# Altium footprint library FootPrintLib_9.PcbLib: 287 footprints (part 9 of 18)
Each footprint in its own frame and in the unit in brackets; x right, y up, seen from the top. Pads: shape width x height; smd on the part's side, far side on the other; paste and mask are expansions set on the pad; w line width, h text height; cw(c..) or ccw(c..) is an arc to the next point about the centre after c.
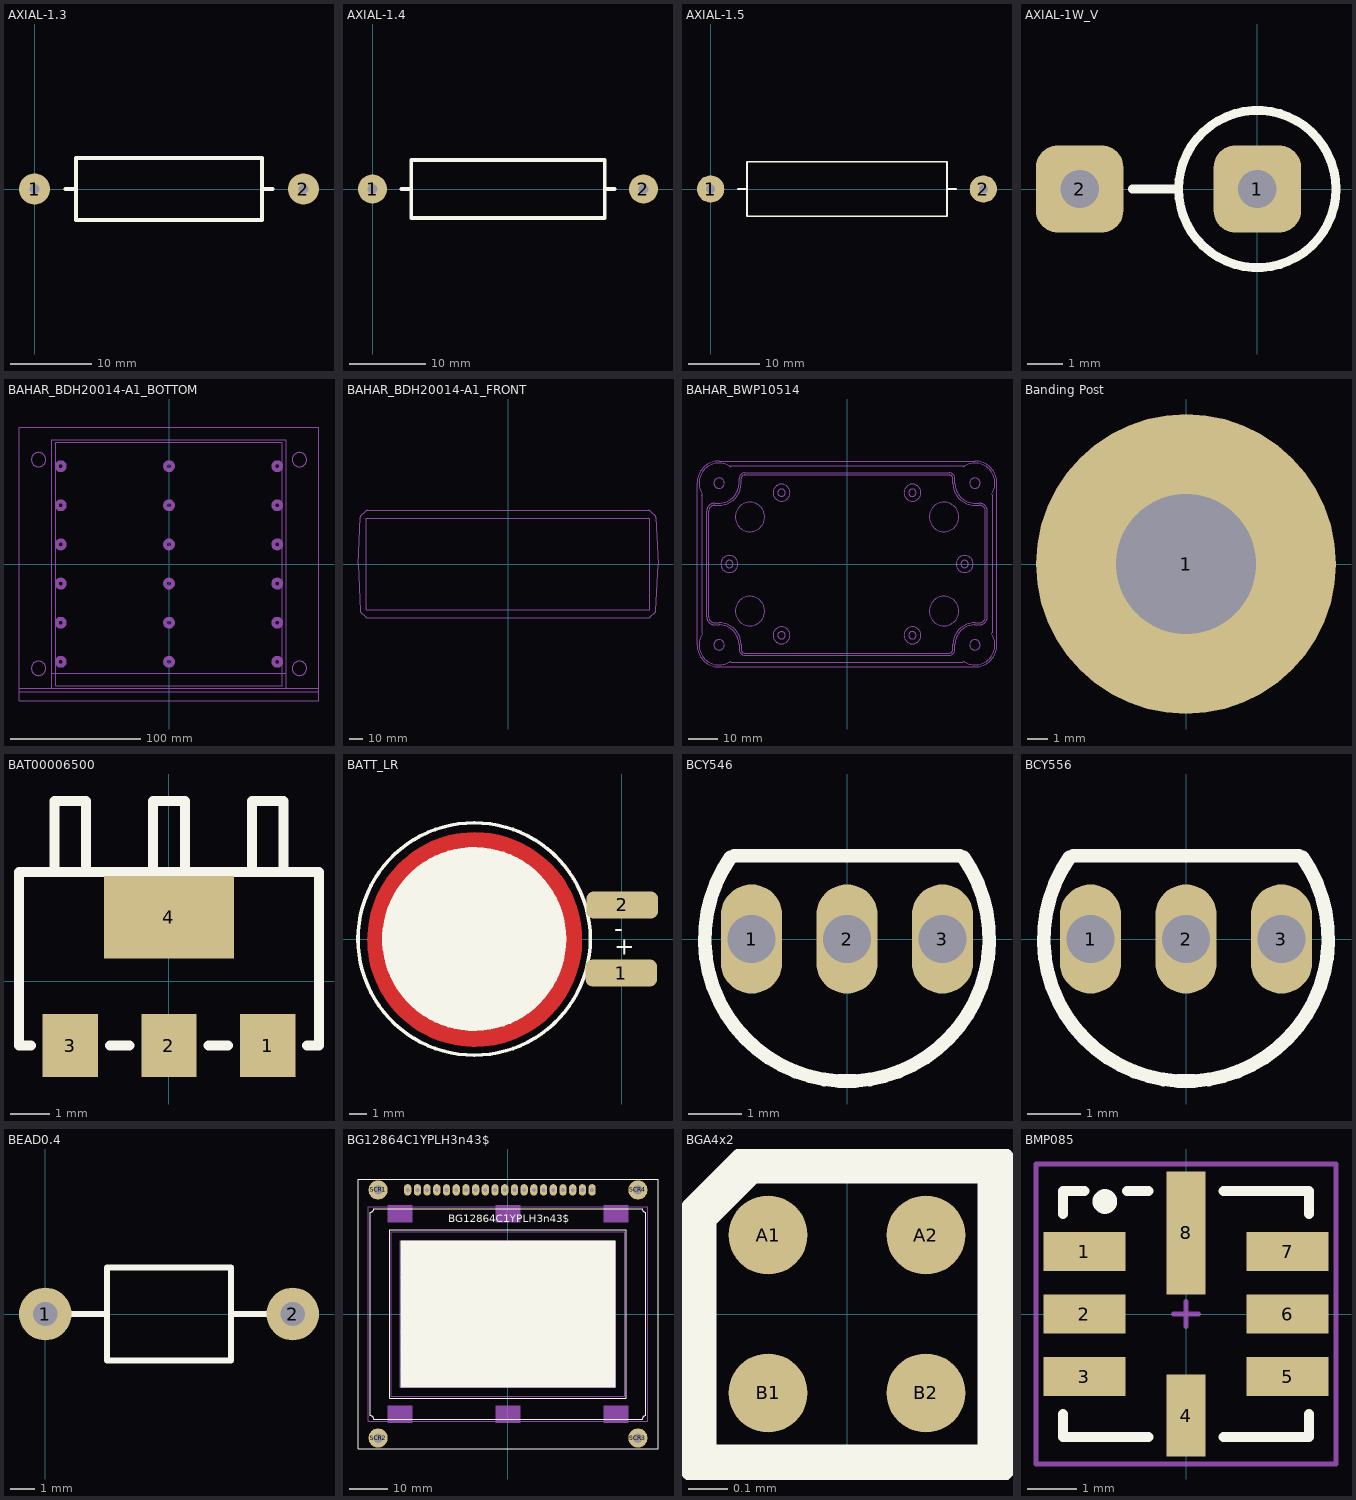
[diagram p8: the footprints below, top view; thin cyan lines are the x and y axes]

## AXIAL-1.3 [mm] "Resistor"
pads (2):
  round 3.81 hole 1.27: 1(0,0) 2(33.02,0)
Top Overlay:
  lines w0.508: 3.81,0 5.08,0 ; 27.94,0 29.21,0 ; 5.08,0 5.08,3.81 27.94,3.81 27.94,-3.81 5.08,-3.81 5.08,0

## AXIAL-1.4 [mm] "Resistor"
pads (2):
  round 3.81 hole 1.27: 1(0,0) 2(35.56,0)
Top Overlay:
  lines w0.508: 3.81,0 5.08,0 ; 30.48,0 31.75,0 ; 5.08,0 5.08,-3.81 30.48,-3.81 30.48,3.81 5.08,3.81 5.08,0

## AXIAL-1.5 [mm] "Resistor"
pads (2):
  round 3.81 hole 1.27: 1(0,0) 2(38.1,0)
Top Overlay:
  lines w0.254: 3.81,0 5.08,0 ; 33.02,0 34.29,0 ; 5.08,0 5.08,-3.81 33.02,-3.81 33.02,3.81 5.08,3.81 5.08,0

## AXIAL-1W_V [mm] "Semiconductor Resistor; 2 Leads"
height 16
pads (2):
  rrect50% 2.5x2.5 hole 1.1: 1(0,0) 2(-5.08,0)
Top Overlay:
  circle w0.254: c0,0 r2.25
  lines w0.254: -3.575,0 -2.25,0

## BAHAR_BDH20014-A1_BOTTOM [mm] "Desktop Plastic Box"
height 86
Mechanical 5:
  circle w3: c-83,15 r3
  circle w3: c-83,45 r3
  circle w3: c-83,75 r3
  circle w3: c-83,-15 r3
  circle w3: c-83,-45 r3
  circle w3: c-83,-75 r3
  circle w3: c83,15 r3
  circle w3: c83,45 r3
  circle w3: c83,75 r3
  circle w3: c83,-15 r3
  circle w3: c83,-45 r3
  circle w3: c83,-75 r3
  circle w3: c0,-75 r3
  circle w3: c0,-45 r3
  circle w3: c0,-15 r3
  circle w3: c0,75 r3
  circle w3: c0,45 r3
  circle w3: c0,15 r3
  circle w0.254: c100,80 r5.5
  circle w0.254: c-100,80 r5.5
  circle w0.254: c-100,-80 r5.5
  circle w0.254: c100,-80 r5.5
  lines w0.254: -115,-97.9 115,-97.9 ; -115,-95.4 -90,-95.4 ; -90,-83.9 90,-83.9 ; 115,-95.4 90,-95.4 ; -90,-95.4 -90,95.4 90,95.4 90,-95.4 ; -90,-95.4 90,-95.4 ; -115,-105 115,-105 115,105 -115,105 -115,-105 ; -87,-93.4 87,-93.4 87,93.4 -87,93.4 -87,-93.4
  text "BDH 20014-A1" at -8.128,-27.432 h2

## BAHAR_BDH20014-A1_FRONT [mm] "Desktop Plastic Box"
height 86
Mechanical 5:
  lines w0.254: -111.295,0 -109.6,-34.75 ccw(c-108.1,-34.75) -109.161,-35.811 -105.661,-39.311 ccw(c-104.6,-38.25) -104.6,-39.75 0,-39.9 104.6,-39.75 ccw(c104.6,-38.25) 105.661,-39.311 109.161,-35.811 ccw(c108.1,-34.75) 109.6,-34.75 111.295,0 109.6,34.75 ccw(c108.1,34.75) 109.161,35.811 105.661,39.311 ccw(c104.6,38.25) 104.6,39.75 0,39.9 -104.6,39.75 ccw(c-104.6,38.25) -105.661,39.311 -109.161,35.811 ccw(c-108.1,34.75) -109.6,34.75 -111.295,0 ; -105,-34 105,-34 105,34 -105,34 -105,-34
  text "BDH 20014-A1" at -8.128,-27.432 h2

## BAHAR_BWP10514 [mm] "Water Proof Enclosure"
height 52
Mechanical 5:
  circle w0.254: c-43.5,27.5 r1.75
  circle w0.254: c43.5,27.5 r1.75
  circle w0.254: c-33,-16 r5
  circle w0.254: c-22.25,-24.25 r1.25
  circle w0.254: c-22.25,-24.25 r2.875
  circle w0.254: c-22.25,24.25 r2.875
  circle w0.254: c-22.25,24.25 r1.25
  circle w0.254: c-33,16 r5
  circle w0.254: c33,16 r5
  circle w0.254: c22.25,24.25 r1.25
  circle w0.254: c22.25,24.25 r2.875
  circle w0.254: c40,0 r1.25
  circle w0.254: c40,0 r2.875
  circle w0.254: c22.25,-24.25 r2.875
  circle w0.254: c22.25,-24.25 r1.25
  circle w0.254: c33,-16 r5
  circle w0.254: c-40,0 r2.875
  circle w0.254: c-40,0 r1.25
  circle w0.254: c-43.5,-27.5 r1.75
  circle w0.254: c43.5,-27.5 r1.75
  lines w0.254: -51,-27.5 ccw(c-43.5,-27.5) -43.5,-35 43.5,-35 ccw(c43.5,-27.5) 51,-27.5 51,27.5 ccw(c43.5,27.5) 43.5,35 -43.5,35 ccw(c-43.5,27.5) -51,27.5 -51,-27.5 ; -49.4,-23.4 -49.137,-23.697 ccw(c-43.5,-27.5) -39.697,-33.137 -39.4,-33.4 39.4,-33.4 39.697,-33.137 ccw(c43.5,-27.5) 49.137,-23.697 49.4,-23.4 49.4,23.4 49.137,23.697 ccw(c43.5,27.5) 39.697,33.137 39.4,33.4 -39.4,33.4 -39.697,33.137 ccw(c-43.5,27.5) -49.137,23.697 -49.4,23.4 -49.4,-23.4 ; -47.7,-18 ccw(c-45,-18) -45,-20.7 -43.5,-20.7 cw(c-43.5,-27.5) -36.7,-27.5 -36.7,-29 ccw(c-34.7,-29) -34.7,-31 34.7,-31 ccw(c34.7,-29) 36.7,-29 36.7,-27.5 cw(c43.5,-27.5) 43.5,-20.7 45,-20.7 ccw(c45,-18) 47.7,-18 47.7,18 ccw(c45,18) 45,20.7 43.5,20.7 cw(c43.5,27.5) 36.7,27.5 36.7,29 ccw(c34.7,29) 34.7,31 -34.7,31 ccw(c-34.7,29) -36.7,29 -36.7,27.5 cw(c-43.5,27.5) -43.5,20.7 -45,20.7 ccw(c-45,18) -47.7,18 -47.7,-18 ; -47,-18 ccw(c-45,-18) -45,-20 -43.5,-20 cw(c-43.5,-27.5) -36,-27.5 -36,-29 ccw(c-34.7,-29) -34.7,-30.3 34.7,-30.3 ccw(c34.7,-29) 36,-29 36,-27.5 cw(c43.5,-27.5) 43.5,-20 45,-20 ccw(c45,-18) 47,-18 47,18 ccw(c45,18) 45,20 43.5,20 cw(c43.5,27.5) 36,27.5 36,29 ccw(c34.7,29) 34.7,30.3 -34.7,30.3 ccw(c-34.7,29) -36,29 -36,27.5 cw(c-43.5,27.5) -43.5,20 -45,20 ccw(c-45,18) -47,18 -47,-18
  text "BWP 10514" at -8.128,-27.432 h2

## Banding Post [mm]
pads (1):
  round 15 hole 7: 1(0,0)

## BAT00006500 [mm] "3PIN Battery Connector, Vertical (Without Post)"
height 6.5
pads (4):
  rect 1.4x1.6 smd: 1(2.5,-1.625) 2(0,-1.625) 3(-2.5,-1.625)
  rect 3.3x2.1 smd: 4(0,1.625)
Top Overlay:
  lines w0.254: -3.5,-1.625 -3.8,-1.625 -3.8,2.775 3.8,2.775 3.8,-1.625 3.5,-1.625 ; -2.9,2.775 -2.9,4.575 -2.1,4.575 -2.1,2.775 ; -1.5,-1.625 -1,-1.625 ; -0.4,2.775 -0.4,4.575 0.4,4.575 0.4,2.775 ; 1,-1.625 1.5,-1.625 ; 2.1,2.775 2.1,4.575 2.9,4.575 2.9,2.775

## BATT_LR [mm]
pads (2):
  rrect50% 4x1.5 smd: 1(-0.025,-1.905) 2(0.025,1.905)
Top Layer:
  pour cut-out: -2.226,-0.032 -2.23,0.215 -2.241,0.416 -2.263,0.639 -2.287,0.837 -2.319,1.025 -2.372,1.3 -2.433,1.538 -2.512,1.808 -2.656,2.208 -2.835,2.609 -3.038,2.985 -3.145,3.162 -3.313,3.415 -3.651,3.849 -3.965,4.196 -4.389,4.585 -4.827,4.912 -5.115,5.104 -5.641,5.388 -6.043,5.558 -6.503,5.715 -6.875,5.818 -7.35,5.907 -7.715,5.947 -8.234,5.971 -8.239,5.968 -8.645,5.953 -8.994,5.916 -9.267,5.875 -9.679,5.792 -10.118,5.663 -10.434,5.549 -10.644,5.462 -10.958,5.312 -11.281,5.133 -11.733,4.842 -11.951,4.67 -12.237,4.432 -12.519,4.161 -12.824,3.827 -13.108,3.456 -13.435,2.948 -13.693,2.452 -13.937,1.815 -14.038,1.466 -14.11,1.145 -14.164,0.833 -14.223,0.233 -14.225,-0.034 -14.221,-0.258 -14.197,-0.614 -14.164,-0.894 -14.114,-1.179 -14.029,-1.57 -13.929,-1.898 -13.767,-2.338 -13.599,-2.696 -13.496,-2.897 -13.348,-3.153 -13.178,-3.417 -12.953,-3.731 -12.695,-4.039 -12.451,-4.29 -12.139,-4.58 -11.718,-4.912 -11.401,-5.123 -11.028,-5.335 -10.663,-5.516 -10.33,-5.654 -9.943,-5.783 -9.605,-5.872 -9.208,-5.946 -9.007,-5.981 -8.714,-6.012 -8.383,-6.029 -8.134,-6.031 -7.684,-6.007 -7.13,-5.937 -6.556,-5.8 -5.938,-5.584 -5.268,-5.254 -4.836,-4.986 -4.321,-4.589 -3.928,-4.218 -3.498,-3.733 -3.166,-3.262 -2.876,-2.753 -2.686,-2.341 -2.533,-1.932 -2.402,-1.485 -2.298,-0.987 -2.247,-0.601
Top Overlay:
  circle w0.2: c-8.255,0 r6.5
  circle w0.3: c-8.255,0 r5
  region: -3.255,0 -3.327,0.762 -3.556,1.651 -3.988,2.616 -4.572,3.378 -5.258,4.013 -5.791,4.318 -6.401,4.674 -7.01,4.877 -7.671,4.953 -8.407,5.004 -9.246,4.928 -10.084,4.699 -10.871,4.242 -11.43,3.861 -11.862,3.48 -12.116,3.15 -12.37,2.896 -12.624,2.413 -12.852,1.93 -12.979,1.575 -13.081,1.27 -13.183,0.813 -13.233,0.356 -13.259,-0.076 -13.208,-0.559 -13.183,-0.94 -13.03,-1.422 -12.827,-1.905 -12.725,-2.159 -12.548,-2.565 -12.294,-2.972 -11.963,-3.353 -11.608,-3.708 -11.227,-4.013 -10.897,-4.267 -10.185,-4.623 -9.804,-4.775 -9.398,-4.826 -8.966,-4.953 -8.407,-5.004 -7.925,-5.004 -7.391,-4.953 -6.858,-4.826 -6.325,-4.597 -5.715,-4.343 -5.359,-4.089 -4.877,-3.734 -4.47,-3.302 -4.191,-2.972 -3.886,-2.515 -3.607,-1.905 -3.404,-1.397 -3.302,-0.864 -3.226,-0.305
  text "+" at -0.432,-0.889 h1
  text "-" at -0.432,0.127 h1
3D body "battry smd.STEP": height 2.16, standoff -0.12, extent -14.331,-5.898 0.069,6.102

## BCY546 [mil]
pads (3):
  oval 45x80 hole 35: 1(-70,0) 2(0,0) 3(70,0)
Top Overlay:
  lines w10: -85.46,59.84 ccw(c0,0) 85.46,59.84 ; -82.68,61.02 82.68,61.02

## BCY556 [mil]
pads (3):
  oval 45x80 hole 35: 1(-70,0) 2(0,0) 3(70,0)
Top Overlay:
  lines w10: -85.46,59.84 ccw(c0,0) 85.46,59.84 ; -82.68,61.02 82.68,61.02

## BEAD0.4 [mil]
pads (2):
  round 85 hole 39.37: 1(0.45,0.4) 2(400.45,0.4)
Top Overlay:
  lines w10: 0.45,0.4 100.45,0.4 ; 400.45,0.4 300.45,0.4 ; 300.45,0.4 300.45,75.4 100.45,75.4 100.45,-74.6 300.45,-74.6 300.45,0.4

## BG12864C1YPLH3n43$ [mm] "12864 LCD Display Module (LCM)"
height 86
pads (24):
  oval 1.9x3 hole 1: 1(-26.25,32.46) 2(-23.71,32.46) 3(-21.17,32.46) 4(-18.63,32.46) 5(-16.09,32.46) 6(-13.55,32.46) 7(-11.01,32.46) 8(-8.47,32.46) 9(-5.93,32.46) 10(-3.39,32.46) 11(-0.85,32.46) 12(1.69,32.46) 13(4.23,32.46) 14(6.77,32.46) 15(9.31,32.46) 16(11.85,32.46) 17(14.39,32.46) 18(16.93,32.46) 19(19.47,32.46) 20(22.01,32.46)
  round 5 hole 2.5: SCR1(-34,32.46) SCR2(-34,-32.46) SCR3(34,-32.46) SCR4(34,32.46)
Top Overlay:
  rectangle: -28.15,-19.19 28.15,19.19
  lines w0.254: -39.25,-35.25 -39.25,35.25 39.25,35.25 39.25,-35.25 -39.25,-35.25 ; -36.1,-26.6 cw(c-36.1,-27.6) -35.1,-27.6 35.1,-27.6 cw(c36.1,-27.6) 36.1,-26.6 36.1,26.6 cw(c36.1,27.6) 35.1,27.6 -35.1,27.6 cw(c-36.1,27.6) -36.1,26.6 -36.1,-26.6 ; -31,-22 -31,22 31,22 31,-22 -31,-22
  text "BG12864C1YPLH3n43$" at -15.596,24.003 h2
Mechanical 5:
  rectangle: 25,-28.5 31.5,-24
  rectangle: -3.25,-28.5 3.25,-24
  rectangle: -31.5,-28.5 -25,-24
  rectangle: -31.5,24 -25,28.5
  rectangle: -3.25,24 3.25,28.5
  rectangle: 25,24 31.5,28.5
  lines w0.254: -28.15,-14.392 28.15,-14.392 ; -28.15,-9.595 28.15,-9.595 ; -28.15,-4.797 28.15,-4.797 ; -28.15,0 28.15,0 ; -28.15,4.797 28.15,4.797 ; -28.15,9.595 28.15,9.595 ; -28.15,14.393 28.15,14.393 ; -24.631,-19.19 -24.631,19.19 ; -21.112,-19.19 -21.112,19.19 ; -17.594,-19.19 -17.594,19.19 ; -14.075,-19.19 -14.075,19.19 ; -10.556,-19.19 -10.556,19.19 ; -7.037,-19.19 -7.037,19.19 ; -3.519,-19.19 -3.519,19.19 ; 0,-19.19 0,19.19 ; 3.519,-19.19 3.519,19.19 ; 7.038,-19.19 7.038,19.19 ; 10.556,-19.19 10.556,19.19 ; 14.075,-19.19 14.075,19.19 ; 17.594,-19.19 17.594,19.19 ; 21.113,-19.19 21.113,19.19 ; 24.631,-19.19 24.631,19.19 ; -36.6,-28.1 36.6,-28.1 36.6,28.1 -36.6,28.1 -36.6,-28.1 ; -30.5,-21.5 30.5,-21.5 30.5,21.5 -30.5,21.5 -30.5,-21.5 ; -28.15,-19.19 28.15,-19.19 28.15,19.19 -28.15,19.19 -28.15,-19.19

## BGA4x2 [mm]
pads (4):
  round 0.2 smd: A1(-0.2,0.2) A2(0.2,0.2) B1(-0.2,-0.2) B2(0.2,-0.2)
Top Overlay:
  lines w0.1: -0.38,-0.38 0.38,-0.38 0.38,0.38 -0.25,0.38 -0.38,0.25 -0.38,-0.38

## BMP085 [mm] "BMP085 SMD Digital barometric pressure sensor"
height 1.32
pads (8):
  rect 1.67x0.8 smd: 1(-2.065,1.27) 2(-2.065,0) 3(-2.065,-1.27) 5(2.065,-1.27) 6(2.065,0) 7(2.065,1.27)
  rect 0.8x1.67 smd: 4(0,-2.065)
  rect 0.8x2.5 smd: 8(0,1.65)
Top Overlay:
  circle w0.25: c-1.649,2.286 r0.125
  lines w0.2: -2.5,-2.032 -2.5,-2.5 -0.762,-2.5 ; -2.5,2.032 -2.5,2.5 -2.066,2.5 ; -1.197,2.5 -0.762,2.5 ; 0.762,-2.5 2.5,-2.5 2.5,-2.032 ; 0.762,2.5 2.5,2.5 2.5,2.032
Mechanical 15:
  lines w0.1: -0.254,0 0.254,0 ; 0,-0.254 0,0.254 ; -3.048,-3.048 3.048,-3.048 3.048,3.048 -3.048,3.048 -3.048,-3.048
3D body "User Library-BMP085-Barometer.step": height 1.22, standoff 0.01, extent -2.5,-2.46 2.5,2.54